# Altium footprint library Yalynka.PcbLib: 4 footprints
Each footprint in its own frame and in the unit in brackets; x right, y up, seen from the top. Pads: shape width x height; smd on the part's side, far side on the other; paste and mask are expansions set on the pad; w line width, h text height; cw(c..) or ccw(c..) is an arc to the next point about the centre after c.
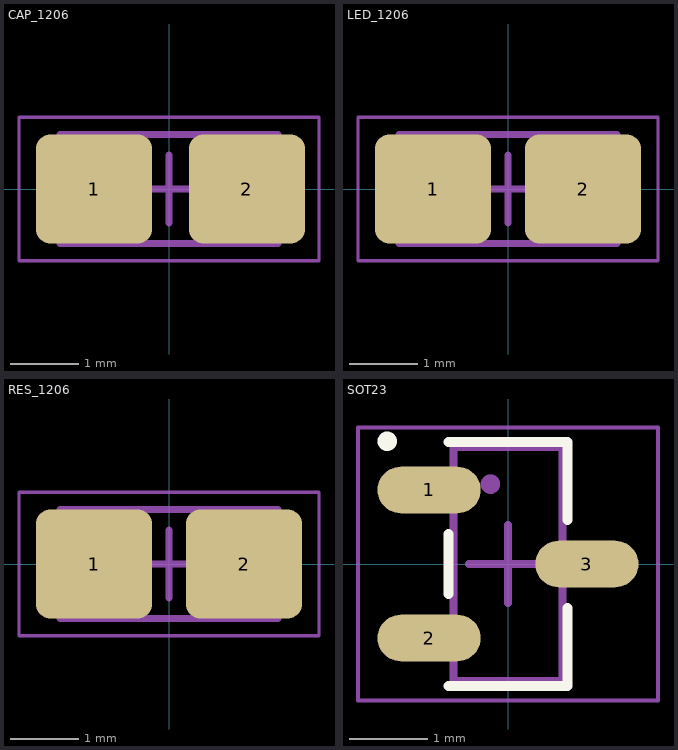
[diagram p0: the footprints below, top view; thin cyan lines are the x and y axes]

## CAP_1206 [mm]
height 1.2
pads (2):
  rrect25% 1.7x1.6 smd: 1(-1.1,0) 2(1.143,0)
Mechanical 13:
  lines w0.1: -1.6,-0.8 1.6,-0.8 1.6,0.8 -1.6,0.8 -1.6,-0.8
Mechanical 15:
  lines w0.05: -2.2,-1.05 2.2,-1.05 2.2,1.05 -2.2,1.05 -2.2,-1.05
  lines w0.1: -0.5,0 0.5,0 ; 0,-0.5 0,0.5
3D body "CAP_1206.step": height 1.2, standoff 0, extent -1.6,-0.8 1.6,0.8

## LED_1206 [mm]
height 1.1
pads (2):
  rrect25% 1.7x1.6 smd: 1(-1.1,0) 2(1.1,0)
Mechanical 13:
  lines w0.1: -1.6,-0.8 1.6,-0.8 1.6,0.8 -1.6,0.8 -1.6,-0.8
Mechanical 15:
  lines w0.05: -2.2,-1.05 2.2,-1.05 2.2,1.05 -2.2,1.05 -2.2,-1.05
  lines w0.1: -0.5,0 0.5,0 ; 0,-0.5 0,0.5
3D body "LED_1206.step": height 1.1, standoff 0, extent -1.6,-0.8 1.6,0.8

## RES_1206 [mm] "Chip Capacitor, 2-Leads, Body 2,05x1,00mm, IPC Medium Density"
height 0.6
pads (2):
  rrect25% 1.7x1.6 smd: 1(-1.1,0) 2(1.1,0)
Mechanical 13:
  lines w0.1: -1.6,-0.8 1.6,-0.8 1.6,0.8 -1.6,0.8 -1.6,-0.8
Mechanical 15:
  lines w0.05: -2.2,-1.05 2.2,-1.05 2.2,1.05 -2.2,1.05 -2.2,-1.05
  lines w0.1: -0.5,0 0.5,0 ; 0,-0.5 0,0.5
3D body "RES_1206.step": height 0.6, standoff 0, extent -1.6,-0.8 1.6,0.8

## SOT23 [mm] "SOT23, 3-Leads, Body 2,90x2,45mm, Pitch 0,95mm, IPC Medium Density"
height 1.1
pads (3):
  oval 1.325x0.6 smd: 1(-1.012,0.95) 2(-1.012,-0.95) 3(1.012,0)
Top Overlay:
  circle w0.125: c-1.55,1.575 r0.062
  lines w0.127: -0.764,-1.563 0.764,-1.563 0.764,-0.564 ; -0.764,-0.386 -0.764,0.386 ; -0.764,1.563 0.764,1.563 0.764,0.564
Mechanical 13:
  circle w0.125: c-0.225,1.025 r0.062
  lines w0.1: -0.7,-1.5 -0.7,1.5 0.7,1.5 0.7,-1.5 -0.7,-1.5
Mechanical 15:
  lines w0.05: -1.925,-1.75 -1.925,1.75 1.925,1.75 1.925,-1.75 -1.925,-1.75
  lines w0.1: -0.5,0 0.5,0 ; 0,-0.5 0,0.5
3D body "SOT23.step": height 1.1, standoff 0, extent -1.3,-1.5 1.3,1.5